# Altium footprint library WE-VD.PcbLib: 120 footprints (part 5 of 8)
Each footprint in its own frame and in the unit in brackets; x right, y up, seen from the top. Pads: shape width x height; smd on the part's side, far side on the other; paste and mask are expansions set on the pad; w line width, h text height; cw(c..) or ccw(c..) is an arc to the next point about the centre after c.
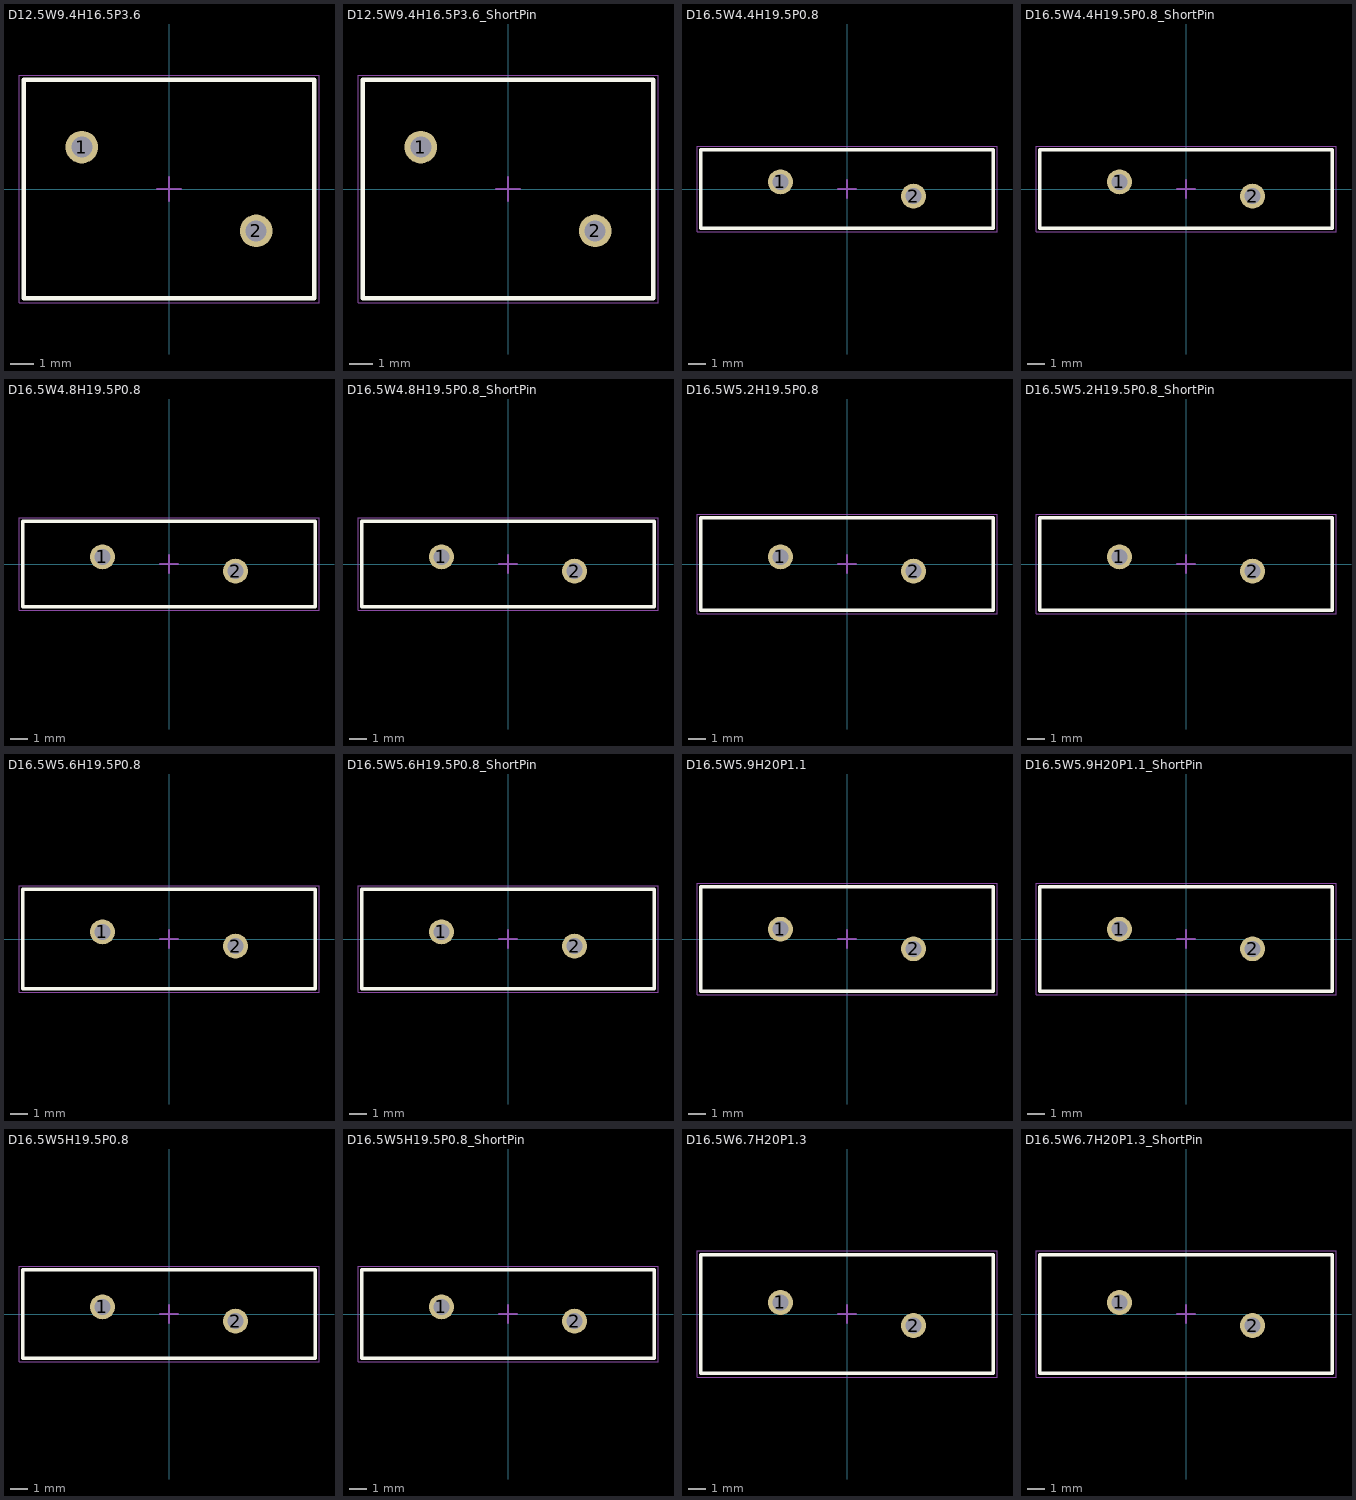
[diagram p4: the footprints below, top view; thin cyan lines are the x and y axes]

## D12.5W9.4H16.5P3.6 [mm] "Disk Varistor, Diameter 12.5mm, Width 9.4mm"
height 16.5
pads (2):
  round 1.4 hole 0.9: 1(-3.75,1.8) 2(3.75,-1.8)
Top Overlay:
  lines w0.2: -6.25,-4.7 6.25,-4.7 6.25,4.7 -6.25,4.7 -6.25,-4.7
Top Assembly:
  lines w0.1: -6.25,-4.7 -6.25,4.7 6.25,4.7 6.25,-4.7 -6.25,-4.7
Top Designator:
  text ".Designator" at -3.647,-0.357 h1
Top 3D Body:
  lines w0.1: -6.25,-4.7 -6.25,4.7 6.25,4.7 6.25,-4.7 -6.25,-4.7
Top Courtyard:
  lines w0.05: -6.45,-4.9 6.45,-4.9 6.45,4.9 -6.45,4.9 -6.45,-4.9
Top Component Center:
  lines w0.1: -0.5,0 0.5,0 ; 0,-0.5 0,0.5
3D body "820x15511x.stp": height 13.4, standoff -22.6, extent -5.5,-3.351 5.5,3.35

## D12.5W9.4H16.5P3.6_ShortPin [mm] "Disk Varistor, Diameter 12.5mm, Width 9.4mm"
height 16.5
pads (2):
  round 1.4 hole 0.9: 1(-3.75,1.8) 2(3.75,-1.8)
Top Overlay:
  lines w0.2: -6.25,-4.7 -6.25,4.7 6.25,4.7 6.25,-4.7 -6.25,-4.7
Top Assembly:
  lines w0.1: -6.25,-4.7 6.25,-4.7 6.25,4.7 -6.25,4.7 -6.25,-4.7
Top Designator:
  text ".Designator" at -3.647,-0.357 h1
Top 3D Body:
  lines w0.1: -6.25,-4.7 6.25,-4.7 6.25,4.7 -6.25,4.7 -6.25,-4.7
Top Courtyard:
  lines w0.05: -6.45,-4.9 -6.45,4.9 6.45,4.9 6.45,-4.9 -6.45,-4.9
Top Component Center:
  lines w0.1: -0.5,0 0.5,0 ; 0,-0.5 0,0.5
3D body "820415511B.stp": height 16.54, standoff -3.05, extent -6.25,-4.7 6.25,4.7

## D16.5W4.4H19.5P0.8 [mm] "Disk Varistor, Diameter 16.5mm, Width 4.4mm"
height 19.5
pads (2):
  round 1.4 hole 0.9: 1(-3.75,0.4) 2(3.75,-0.4)
Top Overlay:
  lines w0.2: -8.25,-2.2 8.25,-2.2 8.25,2.2 -8.25,2.2 -8.25,-2.2
Top Assembly:
  lines w0.1: -8.25,-2.2 -8.25,2.2 8.25,2.2 8.25,-2.2 -8.25,-2.2
Top Designator:
  text ".Designator" at -3.647,-0.357 h1
Top 3D Body:
  lines w0.1: -8.25,-2.2 -8.25,2.2 8.25,2.2 8.25,-2.2 -8.25,-2.2
Top Courtyard:
  lines w0.05: -8.45,-2.4 8.45,-2.4 8.45,2.4 -8.45,2.4 -8.45,-2.4
Top Component Center:
  lines w0.1: -0.5,0 0.5,0 ; 0,-0.5 0,0.5
3D body "820x45001x.stp": height 17.5, standoff -22.51, extent -7.5,-1.55 7.5,1.55

## D16.5W4.4H19.5P0.8_ShortPin [mm] "Disk Varistor, Diameter 16.5mm, Width 4.4mm"
height 19.5
pads (2):
  round 1.4 hole 0.9: 1(-3.75,0.4) 2(3.75,-0.4)
Top Overlay:
  lines w0.2: -8.25,-2.2 -8.25,2.2 8.25,2.2 8.25,-2.2 -8.25,-2.2
Top Assembly:
  lines w0.1: -8.25,-2.2 8.25,-2.2 8.25,2.2 -8.25,2.2 -8.25,-2.2
Top Designator:
  text ".Designator" at -3.647,-0.357 h1
Top 3D Body:
  lines w0.1: -8.25,-2.2 8.25,-2.2 8.25,2.2 -8.25,2.2 -8.25,-2.2
Top Courtyard:
  lines w0.05: -8.45,-2.4 -8.45,2.4 8.45,2.4 8.45,-2.4 -8.45,-2.4
Top Component Center:
  lines w0.1: -0.5,0 0.5,0 ; 0,-0.5 0,0.5
3D body "820545001.stp": height 19.74, standoff -2.85, extent -8.25,-2.25 8.25,2.25

## D16.5W4.8H19.5P0.8 [mm] "Disk Varistor, Diameter 16.5mm, Width 4.8mm"
height 19.5
pads (2):
  round 1.4 hole 0.9: 1(-3.75,0.4) 2(3.75,-0.4)
Top Overlay:
  lines w0.2: -8.25,-2.4 8.25,-2.4 8.25,2.4 -8.25,2.4 -8.25,-2.4
Top Assembly:
  lines w0.1: -8.25,-2.4 -8.25,2.4 8.25,2.4 8.25,-2.4 -8.25,-2.4
Top Designator:
  text ".Designator" at -3.647,-0.357 h1
Top 3D Body:
  lines w0.1: -8.25,-2.4 -8.25,2.4 8.25,2.4 8.25,-2.4 -8.25,-2.4
Top Courtyard:
  lines w0.05: -8.45,-2.6 8.45,-2.6 8.45,2.6 -8.45,2.6 -8.45,-2.6
Top Component Center:
  lines w0.1: -0.5,0 0.5,0 ; 0,-0.5 0,0.5
3D body "820x41311.stp": height 17.5, standoff -22.51, extent -7.5,-1.7 7.5,1.7

## D16.5W4.8H19.5P0.8_ShortPin [mm] "Disk Varistor, Diameter 16.5mm, Width 4.8mm"
height 19.5
pads (2):
  round 1.4 hole 0.9: 1(-3.75,0.4) 2(3.75,-0.4)
Top Overlay:
  lines w0.2: -8.25,-2.4 -8.25,2.4 8.25,2.4 8.25,-2.4 -8.25,-2.4
Top Assembly:
  lines w0.1: -8.25,-2.4 8.25,-2.4 8.25,2.4 -8.25,2.4 -8.25,-2.4
Top Designator:
  text ".Designator" at -3.647,-0.357 h1
Top 3D Body:
  lines w0.1: -8.25,-2.4 8.25,-2.4 8.25,2.4 -8.25,2.4 -8.25,-2.4
Top Courtyard:
  lines w0.05: -8.45,-2.6 -8.45,2.6 8.45,2.6 8.45,-2.6 -8.45,-2.6
Top Component Center:
  lines w0.1: -0.5,0 0.5,0 ; 0,-0.5 0,0.5
3D body "820541311.stp": height 19.74, standoff -2.85, extent -8.25,-2.45 8.25,2.45

## D16.5W5.2H19.5P0.8 [mm] "Disk Varistor, Diameter 16.5mm, Width 5.2mm"
height 19.5
pads (2):
  round 1.4 hole 0.9: 1(-3.75,0.4) 2(3.75,-0.4)
Top Overlay:
  lines w0.2: -8.25,-2.6 8.25,-2.6 8.25,2.6 -8.25,2.6 -8.25,-2.6
Top Assembly:
  lines w0.1: -8.25,-2.6 -8.25,2.6 8.25,2.6 8.25,-2.6 -8.25,-2.6
Top Designator:
  text ".Designator" at -3.647,-0.357 h1
Top 3D Body:
  lines w0.1: -8.25,-2.6 -8.25,2.6 8.25,2.6 8.25,-2.6 -8.25,-2.6
Top Courtyard:
  lines w0.05: -8.45,-2.8 8.45,-2.8 8.45,2.8 -8.45,2.8 -8.45,-2.8
Top Component Center:
  lines w0.1: -0.5,0 0.5,0 ; 0,-0.5 0,0.5
3D body "820x42501x.stp": height 17.5, standoff -22.51, extent -7.5,-1.8 7.5,1.8

## D16.5W5.2H19.5P0.8_ShortPin [mm] "Disk Varistor, Diameter 16.5mm, Width 5.2mm"
height 19.5
pads (2):
  round 1.4 hole 0.9: 1(-3.75,0.4) 2(3.75,-0.4)
Top Overlay:
  lines w0.2: -8.25,-2.6 8.25,-2.6 8.25,2.6 -8.25,2.6 -8.25,-2.6
Top Assembly:
  lines w0.1: -8.25,-2.6 -8.25,2.6 8.25,2.6 8.25,-2.6 -8.25,-2.6
Top Designator:
  text ".Designator" at -3.647,-0.357 h1
Top 3D Body:
  lines w0.1: -8.25,-2.6 -8.25,2.6 8.25,2.6 8.25,-2.6 -8.25,-2.6
Top Courtyard:
  lines w0.05: -8.45,-2.8 8.45,-2.8 8.45,2.8 -8.45,2.8 -8.45,-2.8
Top Component Center:
  lines w0.1: -0.5,0 0.5,0 ; 0,-0.5 0,0.5
3D body "820542501.stp": height 19.74, standoff -2.85, extent -8.25,-2.65 8.25,2.65

## D16.5W5.6H19.5P0.8 [mm] "Disk Varistor, Diameter 16.5mm, Width 5.6mm"
height 19.5
pads (2):
  round 1.4 hole 0.9: 1(-3.75,0.4) 2(3.75,-0.4)
Top Overlay:
  lines w0.2: -8.25,-2.8 8.25,-2.8 8.25,2.8 -8.25,2.8 -8.25,-2.8
Top Assembly:
  lines w0.1: -8.25,-2.8 -8.25,2.8 8.25,2.8 8.25,-2.8 -8.25,-2.8
Top Designator:
  text ".Designator" at -3.647,-0.357 h1
Top 3D Body:
  lines w0.1: -8.25,-2.8 -8.25,2.8 8.25,2.8 8.25,-2.8 -8.25,-2.8
Top Courtyard:
  lines w0.05: -8.45,-3 8.45,-3 8.45,3 -8.45,3 -8.45,-3
Top Component Center:
  lines w0.1: -0.5,0 0.5,0 ; 0,-0.5 0,0.5
3D body "820x43001x.stp": height 17.5, standoff -22.51, extent -7.5,-1.9 7.5,1.9

## D16.5W5.6H19.5P0.8_ShortPin [mm] "Disk Varistor, Diameter 16.5mm, Width 5.6mm"
height 19.5
pads (2):
  round 1.4 hole 0.9: 1(-3.75,0.4) 2(3.75,-0.4)
Top Overlay:
  lines w0.2: -8.25,-2.8 -8.25,2.8 8.25,2.8 8.25,-2.8 -8.25,-2.8
Top Assembly:
  lines w0.1: -8.25,-2.8 8.25,-2.8 8.25,2.8 -8.25,2.8 -8.25,-2.8
Top Designator:
  text ".Designator" at -3.647,-0.357 h1
Top 3D Body:
  lines w0.1: -8.25,-2.8 8.25,-2.8 8.25,2.8 -8.25,2.8 -8.25,-2.8
Top Courtyard:
  lines w0.05: -8.45,-3 -8.45,3 8.45,3 8.45,-3 -8.45,-3
Top Component Center:
  lines w0.1: -0.5,0 0.5,0 ; 0,-0.5 0,0.5
3D body "820543001.stp": height 19.74, standoff -2.85, extent -8.25,-2.85 8.25,2.85

## D16.5W5.9H20P1.1 [mm] "Disk Varistor, Diameter 16.5mm, Width 5.9mm"
height 20
pads (2):
  round 1.4 hole 0.9: 1(-3.75,0.55) 2(3.75,-0.55)
Top Overlay:
  lines w0.2: -8.25,-2.95 8.25,-2.95 8.25,2.95 -8.25,2.95 -8.25,-2.95
Top Assembly:
  lines w0.1: -8.25,-2.95 -8.25,2.95 8.25,2.95 8.25,-2.95 -8.25,-2.95
Top Designator:
  text ".Designator" at -3.647,-0.357 h1
Top 3D Body:
  lines w0.1: -8.25,-2.95 -8.25,2.95 8.25,2.95 8.25,-2.95 -8.25,-2.95
Top Courtyard:
  lines w0.05: -8.45,-3.15 8.45,-3.15 8.45,3.15 -8.45,3.15 -8.45,-3.15
Top Component Center:
  lines w0.1: -0.5,0 0.5,0 ; 0,-0.5 0,0.5
3D body "820x42511x.stp": height 17.5, standoff -22.51, extent -7.5,-2.15 7.5,2.15

## D16.5W5.9H20P1.1_ShortPin [mm] "Disk Varistor, Diameter 16.5mm, Width 5.9mm"
height 20
pads (2):
  round 1.4 hole 0.9: 1(-3.75,0.55) 2(3.75,-0.55)
Top Overlay:
  lines w0.2: -8.25,-2.95 -8.25,2.95 8.25,2.95 8.25,-2.95 -8.25,-2.95
Top Assembly:
  lines w0.1: -8.25,-2.95 8.25,-2.95 8.25,2.95 -8.25,2.95 -8.25,-2.95
Top Designator:
  text ".Designator" at -3.647,-0.357 h1
Top 3D Body:
  lines w0.1: -8.25,-2.95 8.25,-2.95 8.25,2.95 -8.25,2.95 -8.25,-2.95
Top Courtyard:
  lines w0.05: -8.45,-3.15 -8.45,3.15 8.45,3.15 8.45,-3.15 -8.45,-3.15
Top Component Center:
  lines w0.1: -0.5,0 0.5,0 ; 0,-0.5 0,0.5
3D body "820542511.stp": height 20.24, standoff -2.85, extent -8.25,-3 8.25,3

## D16.5W5H19.5P0.8 [mm] "Disk Varistor, Diameter 16.5mm, Width 5mm"
height 17.4
pads (2):
  round 1.4 hole 0.9: 1(-3.75,0.4) 2(3.75,-0.4)
Top Overlay:
  lines w0.2: -8.25,-2.5 -8.25,2.5 8.25,2.5 8.25,-2.5 -8.25,-2.5
Top Assembly:
  lines w0.1: -8.25,-2.5 8.25,-2.5 8.25,2.5 -8.25,2.5 -8.25,-2.5
Top Designator:
  text ".Designator" at -3.647,-0.357 h1
Top 3D Body:
  lines w0.1: -8.25,-2.5 8.25,-2.5 8.25,2.5 -8.25,2.5 -8.25,-2.5
Top Courtyard:
  lines w0.05: -8.45,-2.7 -8.45,2.7 8.45,2.7 8.45,-2.7 -8.45,-2.7
Top Component Center:
  lines w0.1: -0.5,0 0.5,0 ; 0,-0.5 0,0.5
3D body "820x41406x.stp": height 17.5, standoff -22.5, extent -7.5,-1.7 7.5,1.7

## D16.5W5H19.5P0.8_ShortPin [mm] "Disk Varistor, Diameter 16.5mm, Width 5mm"
height 17.4
pads (2):
  round 1.4 hole 0.9: 1(-3.75,0.4) 2(3.75,-0.4)
Top Overlay:
  lines w0.2: -8.25,-2.5 8.25,-2.5 8.25,2.5 -8.25,2.5 -8.25,-2.5
Top Assembly:
  lines w0.1: -8.25,-2.5 -8.25,2.5 8.25,2.5 8.25,-2.5 -8.25,-2.5
Top Designator:
  text ".Designator" at -3.647,-0.357 h1
Top 3D Body:
  lines w0.1: -8.25,-2.5 -8.25,2.5 8.25,2.5 8.25,-2.5 -8.25,-2.5
Top Courtyard:
  lines w0.05: -8.45,-2.7 8.45,-2.7 8.45,2.7 -8.45,2.7 -8.45,-2.7
Top Component Center:
  lines w0.1: -0.5,0 0.5,0 ; 0,-0.5 0,0.5
3D body "820541406.stp": height 19.74, standoff -2.85, extent -8.25,-2.55 8.25,2.55

## D16.5W6.7H20P1.3 [mm] "Disk Varistor, Diameter 16.5mm, Width 6.7mm"
height 20
pads (2):
  round 1.4 hole 0.9: 1(-3.75,0.65) 2(3.75,-0.65)
Top Overlay:
  lines w0.2: -8.25,-3.35 -8.25,3.35 8.25,3.35 8.25,-3.35 -8.25,-3.35
Top Assembly:
  lines w0.1: -8.25,-3.35 8.25,-3.35 8.25,3.35 -8.25,3.35 -8.25,-3.35
Top Designator:
  text ".Designator" at -3.647,-0.357 h1
Top 3D Body:
  lines w0.1: -8.25,-3.35 8.25,-3.35 8.25,3.35 -8.25,3.35 -8.25,-3.35
Top Courtyard:
  lines w0.05: -8.45,-3.55 -8.45,3.55 8.45,3.55 8.45,-3.55 -8.45,-3.55
Top Component Center:
  lines w0.1: -0.5,0 0.5,0 ; 0,-0.5 0,0.5
3D body "820x42711x.stp": height 17.5, standoff -22.51, extent -7.5,-2.25 7.5,2.25

## D16.5W6.7H20P1.3_ShortPin [mm] "Disk Varistor, Diameter 16.5mm, Width 6.7mm"
height 20
pads (2):
  round 1.4 hole 0.9: 1(-3.75,0.65) 2(3.75,-0.65)
Top Overlay:
  lines w0.2: -8.25,-3.35 8.25,-3.35 8.25,3.35 -8.25,3.35 -8.25,-3.35
Top Assembly:
  lines w0.1: -8.25,-3.35 -8.25,3.35 8.25,3.35 8.25,-3.35 -8.25,-3.35
Top Designator:
  text ".Designator" at -3.647,-0.357 h1
Top 3D Body:
  lines w0.1: -8.25,-3.35 -8.25,3.35 8.25,3.35 8.25,-3.35 -8.25,-3.35
Top Courtyard:
  lines w0.05: -8.45,-3.55 8.45,-3.55 8.45,3.55 -8.45,3.55 -8.45,-3.55
Top Component Center:
  lines w0.1: -0.5,0 0.5,0 ; 0,-0.5 0,0.5
3D body "820442711E.stp": height 20.24, standoff -2.85, extent -8.25,-3 8.25,3